# Altium footprint library FootPrintLib_8.PcbLib: 590 footprints (part 9 of 37)
Each footprint in its own frame and in the unit in brackets; x right, y up, seen from the top. Pads: shape width x height; smd on the part's side, far side on the other; paste and mask are expansions set on the pad; w line width, h text height; cw(c..) or ccw(c..) is an arc to the next point about the centre after c.
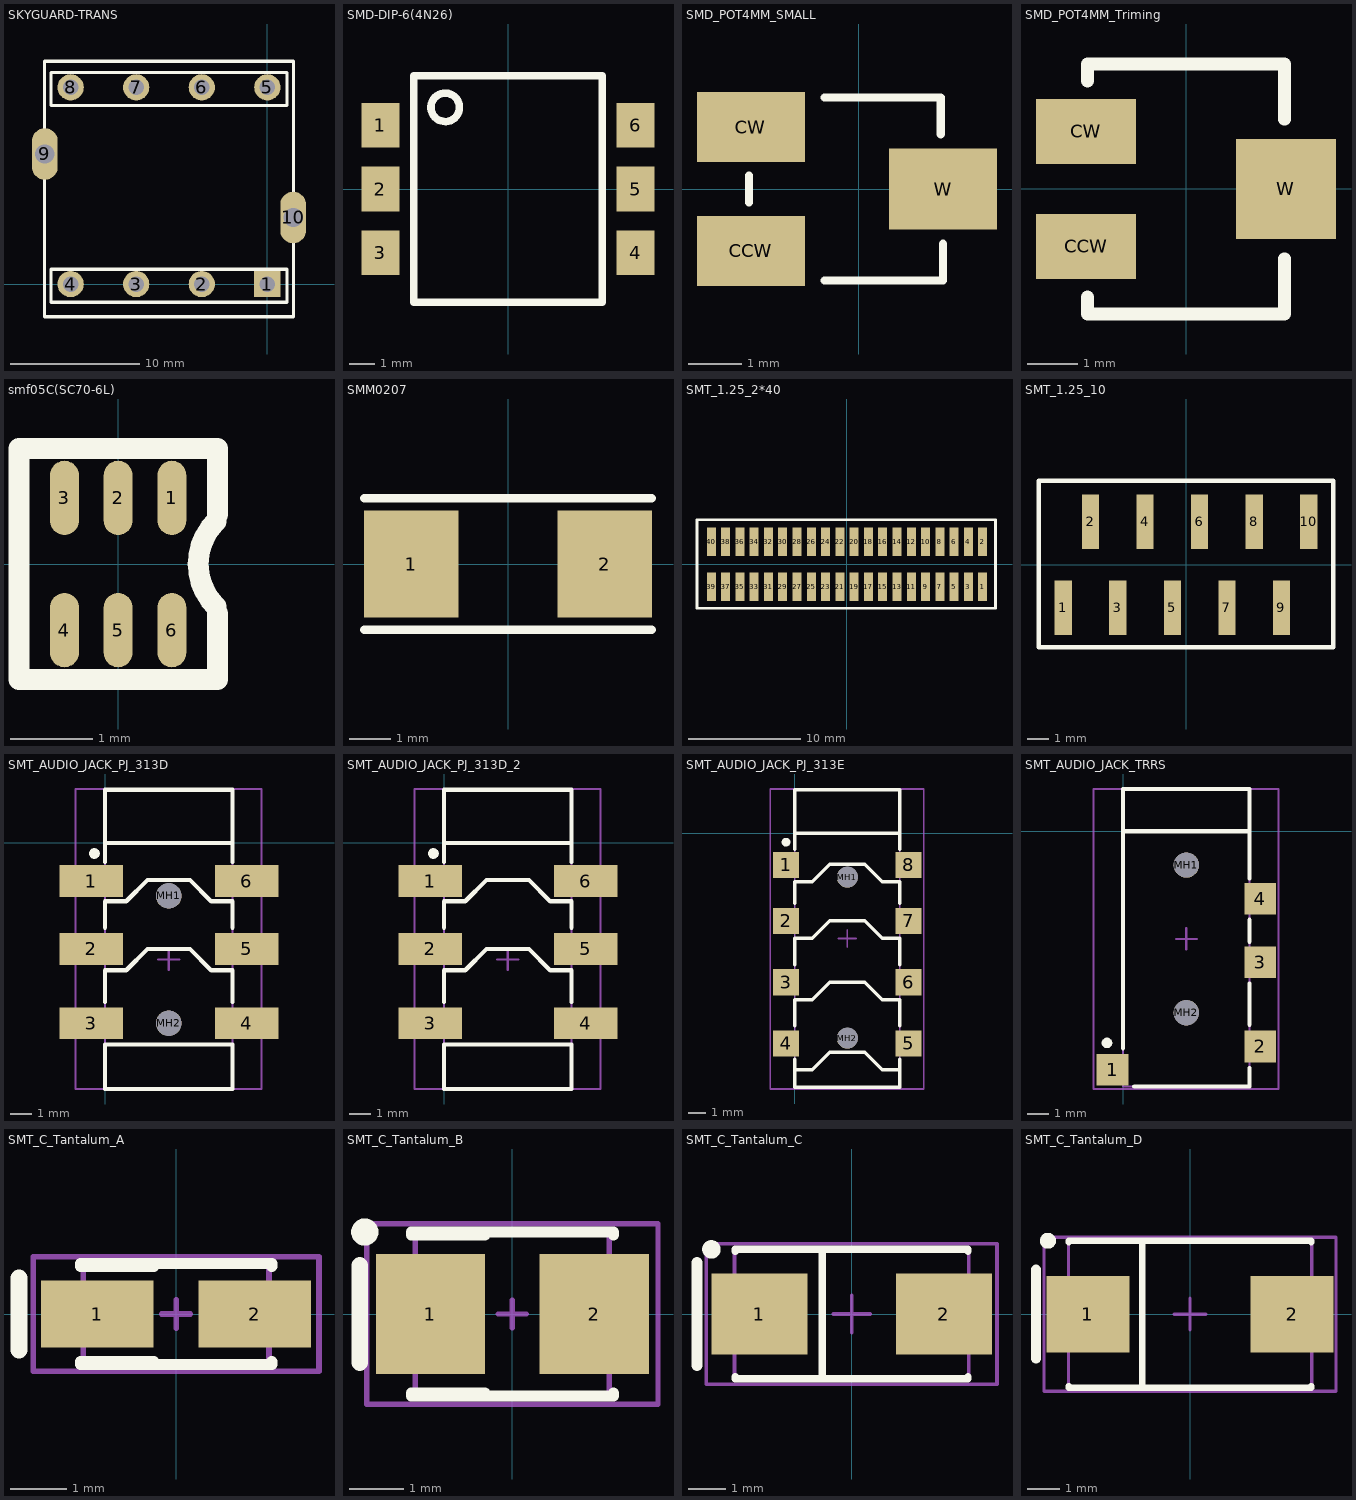
[diagram p8: the footprints below, top view; thin cyan lines are the x and y axes]

## SKYGUARD-TRANS [mm]
pads (10):
  rect 2.032x2.032 hole 1.2: 1(0,0)
  round 2.032 hole 1.2: 2(-5.08,0) 3(-10.16,0) 4(-15.24,0) 5(0,15.24) 6(-5.08,15.24) 7(-10.16,15.24) 8(-15.24,15.24)
  oval 2x4 hole 1.5: 9(-17.24,10.08) 10(2,5.16)
Top Overlay:
  lines w0.254: -17.272,-2.54 -17.272,17.272 2.032,17.272 2.032,-2.54 -17.272,-2.54 ; -16.764,-1.397 1.524,-1.397 1.524,1.143 -16.764,1.143 -16.764,-1.397 ; -16.764,13.843 1.524,13.843 1.524,16.383 -16.764,16.383 -16.764,13.843

## SMD-DIP-6(4N26) [mm]
pads (6):
  rect 1.52x1.78 smd mask+0.05: 1(-5.08,2.54) 2(-5.08,0) 3(-5.08,-2.54) 4(5.08,-2.54) 5(5.08,0) 6(5.08,2.54)
Top Overlay:
  circle w0.3: c-2.5,3.25 r0.566
  lines w0.3: -3.75,-4.5 -3.75,4.5 3.75,4.5 3.75,-4.5 -3.75,-4.5
3D body "User Library-FAIRCHILD N06C_SMDIP-6.STEP": height 5.08, standoff 0, extent -4.95,-4.445 4.95,4.445

## SMD_POT4MM_SMALL [mm] "Square Trimming Potentiometer"
pads (3):
  rect 2x1.3 smd: CCW(-2,-1.15) CW(-2,1.15)
  rect 2x1.5 smd: W(1.568,0)
Top Overlay:
  lines w0.15: -2.032,-0.254 -2.032,0.254 ; -0.635,-1.7 1.568,-1.7 1.568,-1.016 ; -0.635,1.7 1.524,1.7 1.524,1.016
3D body "TRIMMER_PVG3A.STEP": height 2, standoff 0, extent -2.032,-1.7 1.568,1.7

## SMD_POT4MM_Triming [mm] "Square Trimming Potentiometer"
pads (3):
  rect 2x1.3 smd: CCW(-2,-1.15) CW(-2,1.15)
  rect 2x2 smd: W(2,0)
Top Overlay:
  lines w0.254: -1.97,-2.159 -1.97,-2.5 1.97,-2.5 1.97,-1.397 ; -1.97,2.159 -1.97,2.5 1.97,2.5 1.97,1.397
3D body "SW3dPS-Pot 3214.STEP": height 5.4, standoff 0, extent -1.97,-2.4 1.97,2.4

## smf05C(SC70-6L) [mm] "TVS Diode Array"
height 1.1
pads (6):
  oval 0.35x0.9 smd: 1(0.65,0.8) 2(0,0.8) 3(-0.65,0.8) 4(-0.65,-0.8) 5(0,-0.8) 6(0.65,-0.8)
Top Overlay:
  lines w0.254: 1.183,-0.517 cw(c1.7,0) 1.183,0.517 ; 1.2,-0.6 1.2,-1.4 -1.2,-1.4 -1.2,1.4 1.2,1.4 1.2,0.6
3D body "sot363-6.STEP": height 0.93, standoff -0.02, extent -1,-1.05 1,1.05

## SMM0207 [mm]
height 1.5
pads (2):
  rect 2.3x2.6 smd: 1(-2.35,0) 2(2.35,0)
Top Overlay:
  lines w0.2: -3.5,-1.6 3.5,-1.6 ; -3.5,1.6 3.5,1.6
3D body "User Library-1206(3216M) Res.STEP": height 1.53, standoff 0, extent -2,-0.8 2,0.8

## SMT_1.25_2*40 [mm]
height 5.9
pads (40):
  rect 0.8x2.54 smd mask+0: 1(12.065,-2) 2(12.065,2) 3(10.795,-2) 4(10.795,2) 5(9.525,-2) 6(9.525,2) 7(8.255,-2) 8(8.255,2) 9(6.985,-2) 10(6.985,2) 11(5.715,-2) 12(5.715,2) 13(4.445,-2) 14(4.445,2) 15(3.175,-2) 16(3.175,2) 17(1.905,-2) 18(1.905,2) 19(0.635,-2) 20(0.635,2) 21(-0.635,-2) 22(-0.635,2) 23(-1.905,-2) 24(-1.905,2) 25(-3.175,-2) 26(-3.175,2) 27(-4.445,-2) 28(-4.445,2) 29(-5.715,-2) 30(-5.715,2) 31(-6.985,-2) 32(-6.985,2) 33(-8.255,-2) 34(-8.255,2) 35(-9.525,-2) 36(-9.525,2) 37(-10.795,-2) 38(-10.795,2) 39(-12.065,-2) 40(-12.065,2)
Top Overlay:
  lines w0.254: -13.335,-3.905 13.208,-3.905 13.208,3.969 -13.335,3.969 -13.335,-3.905

## SMT_1.25_10 [mm]
height 5.9
pads (10):
  rect 0.8x2.54 smd: 1(-5.715,-2) 2(-4.445,2) 3(-3.175,-2) 4(-1.905,2) 5(-0.635,-2) 6(0.635,2) 7(1.905,-2) 8(3.175,2) 9(4.445,-2) 10(5.715,2)
Top Overlay:
  lines w0.2: -6.858,-3.842 6.858,-3.842 6.858,3.905 -6.858,3.905 -6.858,-3.842

## SMT_AUDIO_JACK_PJ_313D [mm] "PJ-313D 3.5mm SMT Audio Jack"
height 5.2
pads (8):
  rect 3x1.5 smd: 1(-0.652,-1.8) 2(-0.652,-5) 3(-0.652,-8.5) 4(6.678,-8.5) 5(6.678,-5) 6(6.678,-1.8)
  round 1.2 hole 1.2 unplated paste-2539.97 mask+0: MH1(3,-2.5) MH2(3,-8.5)
Top Overlay:
  circle w0.25: c-0.5,-0.5 r0.125
  lines w0.2: 0,-7.5 0,-6 1,-6 2,-5 4,-5 5,-6 6,-6 6,-7.5 ; 0,-4 0,-2.75 1,-2.75 2,-1.75 4,-1.75 5,-2.75 6,-2.75 6,-4 ; 0,-0.9 0,0 ; 6,-0.9 6,0 ; 0,0 0,2.5 6,2.5 6,0 ; 0,0 6,0 ; 0,-11.6 6,-11.6 6,-9.5 5,-9.5 1,-9.5 0,-9.5 0,-11.6
Mechanical 13:
  lines w0.1: 0,0 0,-11.6 6,-11.6 6,0 ; 0,0 0,2.5 6,2.5 6,0 ; 0,0 6,0
  text "PCB Edge" at 0.254,0.254 h0.25
Mechanical 15:
  lines w0.1: 2.5,-5.5 3.5,-5.5 ; 3,-6 3,-5 ; -1.397,-11.6 7.366,-11.6 7.366,2.54 -1.397,2.54 -1.397,-11.6
3D body "JackPJ313D.STEP": height 5, standoff -1, extent -1.503,-11.475 7.497,2.525

## SMT_AUDIO_JACK_PJ_313D_2 [mm] "PJ-313D 3.5mm SMT Audio Jack"
height 5.2
pads (6):
  rect 3x1.5 smd: 1(-0.652,-1.8) 2(-0.652,-5) 3(-0.652,-8.5) 4(6.678,-8.5) 5(6.678,-5) 6(6.678,-1.8)
Top Overlay:
  circle w0.25: c-0.5,-0.5 r0.125
  lines w0.2: 0,-7.5 0,-6 1,-6 2,-5 4,-5 5,-6 6,-6 6,-7.5 ; 0,-4 0,-2.75 1,-2.75 2,-1.75 4,-1.75 5,-2.75 6,-2.75 6,-4 ; 0,-0.9 0,0 ; 6,-0.9 6,0 ; 0,0 0,2.5 6,2.5 6,0 ; 0,0 6,0 ; 0,-11.6 6,-11.6 6,-9.5 5,-9.5 1,-9.5 0,-9.5 0,-11.6
Mechanical 13:
  lines w0.1: 0,0 0,-11.6 6,-11.6 6,0 ; 0,0 0,2.5 6,2.5 6,0 ; 0,0 6,0
  text "PCB Edge" at 0.254,0.254 h0.25
Mechanical 15:
  lines w0.1: 2.5,-5.5 3.5,-5.5 ; 3,-6 3,-5 ; -1.397,-11.6 7.366,-11.6 7.366,2.54 -1.397,2.54 -1.397,-11.6
3D body "JackPJ313D.STEP": height 5, standoff -1, extent -1.503,-11.475 7.497,2.525

## SMT_AUDIO_JACK_PJ_313E [mm] "PJ-313E 3.5mm SMT Audio Jack"
height 5.2
pads (10):
  rect 1.5x1.5 smd: 1(-0.5,-1.8) 2(-0.5,-5) 3(-0.5,-8.5) 4(-0.5,-12) 5(6.5,-12) 6(6.5,-8.5) 7(6.5,-5) 8(6.5,-1.8)
  round 1.2 hole 1.2 unplated paste-2539.97 mask+0: MH1(3,-2.5) MH2(3,-11.7)
Top Overlay:
  circle w0.25: c-0.5,-0.5 r0.125
  lines w0.2: 0,-13.5 1,-13.5 2,-12.5 4,-12.5 5,-13.5 6,-13.5 ; 0,-12.9 0,-14.5 6,-14.5 6,-12.9 ; 0,-11 0,-9.5 1,-9.5 2,-8.5 4,-8.5 5,-9.5 6,-9.5 6,-11 ; 0,-7.5 0,-6 1,-6 2,-5 4,-5 5,-6 6,-6 6,-7.5 ; 0,-4 0,-2.75 1,-2.75 2,-1.75 4,-1.75 5,-2.75 6,-2.75 6,-4 ; 0,-0.9 0,0 ; 6,-0.9 6,0 ; 0,0 6,0 ; 0,0 0,2.5 6,2.5 6,0
Mechanical 13:
  lines w0.1: 0,0 6,0 ; 0,0 0,2.5 6,2.5 6,0 ; 0,0 0,-14.6 6,-14.6 6,0
  text "PCB Edge" at 0.254,0.254 h0.25
Mechanical 15:
  lines w0.1: 2.5,-6 3.5,-6 ; 3,-6.5 3,-5.5 ; -1.397,-14.605 -1.397,2.54 7.366,2.54 7.366,-14.605 -1.397,-14.605
3D body "Audio-Jack-3.5mm.STEP": height 5.06, standoff -0.59, extent -0.981,-14.513 7,2.512

## SMT_AUDIO_JACK_TRRS [mm] "TRRS 3.5mm SMT Audio Jack"
height 5.5
pads (6):
  rect 1.5x1.5 smd: 1(-0.5,-11.3) 2(6.5,-10.2) 3(6.5,-6.2) 4(6.5,-3.2)
  round 1.2 hole 1.2 unplated paste-2539.97 mask+0: MH1(3,-1.6) MH2(3,-8.6)
Top Overlay:
  circle w0.25: c-0.762,-10.033 r0.125
  lines w0.2: 0,-10.287 0,-6 0,-2.75 0,0 ; 0.533,-12.1 6,-12.1 6,-11.227 ; 5.994,-9.169 5.994,-7.214 ; 5.994,-5.232 5.994,-4.191 ; 6,-2.235 6,0 ; 0,0 0,2 6,2 6,0 ; 0,0 6,0
Mechanical 13:
  lines w0.1: 0,0 0,-12.1 6,-12.1 6,0 ; 0,0 0,2 6,2 6,0 ; 0,0 6,0
  text "PCB Edge" at 0.254,0.254 h0.25
Mechanical 15:
  lines w0.1: 2.505,-5.1 3.505,-5.1 ; 2.997,-5.597 2.997,-4.597 ; -1.397,-12.217 7.366,-12.217 7.366,2.007 -1.397,2.007 -1.397,-12.217

## SMT_C_Tantalum_A [mm] "Capacitor, SM Tantalum; Body 3.2 x 1.6 mm (LxW typ)"
height 1.8
pads (2):
  rect 2x1.2 smd: 1(-1.4,0) 2(1.4,0)
Top Overlay:
  lines w0.2: -1.7,-0.9 1.7,-0.9 1.7,-0.85 ; -1.7,-0.85 -0.4,-0.85 ; -1.7,0.85 -0.4,0.85 ; -1.7,0.9 1.7,0.9 1.7,0.85
  lines w0.305: -2.794,-0.635 -2.794,0.635
Mechanical 13:
  lines w0.1: -1.651,-0.889 -1.651,0.889 1.651,0.889 1.651,-0.889 -1.651,-0.889
Mechanical 15:
  lines w0.1: -0.254,0 0.254,0 ; 0,-0.254 0,0.254 ; -2.54,-1.016 2.54,-1.016 2.54,1.016 -2.54,1.016 -2.54,-1.016
3D body "User Library-Cap-Tantalum-Case-A-3216-18.step": height 1.6, standoff 0, extent -1.6,-0.8 1.6,0.8

## SMT_C_Tantalum_B [mm] "Capacitor, SM Tantalum; Body 3.5 x 2.8 mm (LxW typ)"
height 2.1
pads (2):
  rect 2x2.2 smd: 1(-1.5,0) 2(1.5,0)
Top Overlay:
  circle w0.25: c-2.7,1.5 r0.125
  lines w0.2: -1.85,-1.5 1.85,-1.5 1.85,-1.45 ; -1.85,-1.45 -0.5,-1.45 ; -1.85,1.45 -0.5,1.45 ; -1.85,1.5 1.85,1.5 1.85,1.45
  lines w0.305: -2.794,-0.889 -2.794,0.889
Mechanical 13:
  lines w0.1: -1.778,-1.524 1.778,-1.524 1.778,1.524 -1.778,1.524 -1.778,-1.524
Mechanical 15:
  lines w0.1: -0.254,0 0.254,0 ; 0,-0.254 0,0.254 ; -2.667,-1.651 -2.667,1.651 2.667,1.651 2.667,-1.651 -2.667,-1.651
3D body "User Library-Cap-Tantalum-Case-B-3528-21.step": height 1.9, standoff 0, extent -1.75,-1.403 1.75,1.397

## SMT_C_Tantalum_C [mm] "Capacitor, SM Tantalum; Body 6.0 x 3.2 mm (LxW typ)"
height 2.8
pads (2):
  rect 2.6x2.2 smd: 1(-2.5,0) 2(2.5,0)
Top Overlay:
  circle w0.25: c-3.8,1.75 r0.125
  lines w0.2: -3.15,-1.7 -3.15,-1.75 3.15,-1.75 3.15,-1.7 ; -3.15,1.7 -3.15,1.75 3.15,1.75 3.15,1.7 ; -0.8,-1.75 -0.8,1.75
  lines w0.305: -4.191,-1.397 -4.191,1.397
Mechanical 13:
  lines w0.1: -3.175,-1.778 3.175,-1.778 3.175,1.778 -3.175,1.778 -3.175,-1.778
Mechanical 15:
  lines w0.1: -0.5,0 0.5,0 ; 0,-0.5 0,0.5 ; -3.937,-1.905 -3.937,1.905 3.937,1.905 3.937,-1.905 -3.937,-1.905
3D body "User Library-Cap-Tantalum-6032-28 C-CASE.step": height 2.8, standoff 0, extent -3.15,-1.747 3.15,1.753

## SMT_C_Tantalum_D [mm] "Capacitor, SM Tantalum; Body 7.3 x 4.3 mm (LxW typ)"
height 3.1
pads (2):
  rect 2.6x2.4 smd: 1(-3.2,0) 2(3.2,0)
Top Overlay:
  circle w0.25: c-4.45,2.3 r0.125
  lines w0.2: -3.8,-2.25 -3.8,-2.3 3.8,-2.3 3.8,-2.25 ; -3.8,2.25 -3.8,2.3 3.8,2.3 3.8,2.25 ; -1.5,-2.3 -1.5,2.3
  lines w0.305: -4.826,-1.397 -4.826,1.397
Mechanical 13:
  lines w0.1: -3.81,-2.286 -3.81,2.286 3.81,2.286 3.81,-2.286 -3.81,-2.286
Mechanical 15:
  lines w0.1: -0.5,0 0.5,0 ; 0,-0.5 0,0.5 ; -4.572,-2.413 4.572,-2.413 4.572,2.413 -4.572,2.413 -4.572,-2.413
3D body "User Library-Cap-Tantalum 7343-31 D-CASE.step": height 3.1, standoff 0, extent -3.81,-2.286 3.79,2.314